# Altium schematic symbol library MIC5365-3.3YC5-TR.SchLib: 1 symbol
Pins are listed as number, name and electrical type; pins without a type are passive.

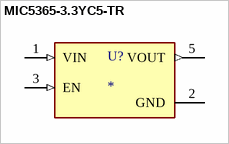
[diagram p0: symbol MIC5365-3.3YC5-TR]

## MIC5365-3.3YC5-TR
designator U?
Linear Voltage Regulator IC Positive Fixed 1 Output 150mA SC-70-5; MF: Microchip; MP: MIC5365-3.3YC5-TR; SnapEDA_Link: https://www.snapeda.com/parts/MIC5365-3.3YC5-TR/Microchip/view-part/?ref=snap; Package: SC-70-5 Microchip; Value: *; Check_prices: https://www.snapeda.com/parts/MIC5365-3.3YC5-TR/Microchip/view-part/?ref=eda
footprint SOT65P210X110-5N
pins: 1 VIN (in), 2 GND (power), 3 EN (in), 5 VOUT (out)